# Altium schematic symbol library Resistor.SchLib: 1085 symbols (part 9 of 29)
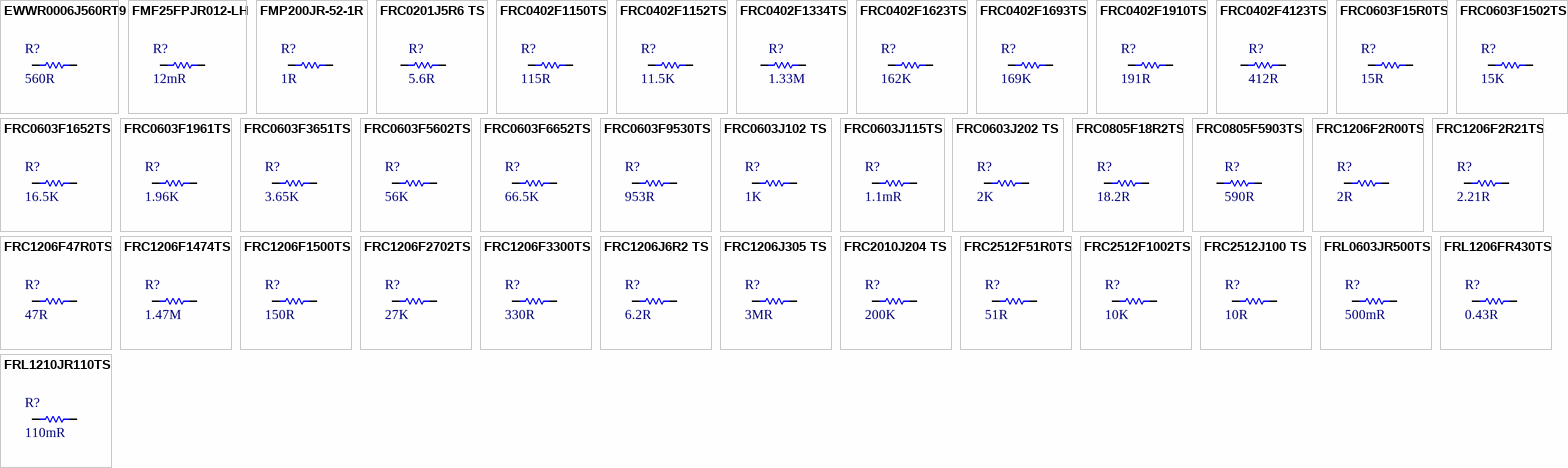
[diagram p35: symbols EWWR0006J560RT9 to FRL1210JR110TS]

## FRC0603F3651TS
designator R?, comment 3.65K
100mW Thick Film Resistors 75V ±100ppm/℃ ±1% 3.65kΩ 0603 Chip Resistor - Surface Mount ROHS; Manufacturer: FOJAN; Manufacturer Part Number: FRC0603F3651TS; Package: 0603; LCSC Part Number: C2930089; Item Type: Resistor; ComponentLink1Description: LCSC; ComponentLink1URL: https://www.lcsc.com/product-detail/Chip-Resistor-Surface-Mount_FOJAN-FRC0603F3651TS_C2930089.html
footprint Res-0603
pins: 1, 2

## FRC0603F5602TS
designator R?, comment 56K
100mW Thick Film Resistors 75V ±100ppm/℃ ±1% 56kΩ 0603 Chip Resistor - Surface Mount ROHS; Manufacturer: FOJAN; Manufacturer Part Number: FRC0603F5602TS; Package: 0603; LCSC Part Number: C2907053; Item Type: Resistor; ComponentLink1Description: LCSC; ComponentLink1URL: https://www.lcsc.com/product-detail/Chip-Resistor-Surface-Mount_FOJAN-FRC0603F5602TS_C2907053.html
footprint Res-0603
pins: 1, 2

## FRC0603F6652TS
designator R?, comment 66.5K
100mW Thick Film Resistors 75V ±100ppm/℃ ±1% 66.5kΩ 0603 Chip Resistor - Surface Mount ROHS; Manufacturer: FOJAN; Manufacturer Part Number: FRC0603F6652TS; Package: 0603; LCSC Part Number: C2933250; Item Type: Resistor; ComponentLink1Description: LCSC; ComponentLink1URL: https://www.lcsc.com/product-detail/Chip-Resistor-Surface-Mount_FOJAN-FRC0603F6652TS_C2933250.html
footprint Res-0603
pins: 1, 2

## FRC0603F9530TS
designator R?, comment 953R
100mW Thick Film Resistors 75V ±100ppm/℃ ±1% 953Ω 0603 Chip Resistor - Surface Mount ROHS; Manufacturer: FOJAN; Manufacturer Part Number: FRC0603F9530TS; Package: 0603; LCSC Part Number: C2933268; Item Type: Resistor; ComponentLink1Description: LCSC; ComponentLink1URL: https://www.lcsc.com/product-detail/Chip-Resistor-Surface-Mount_FOJAN-FRC0603F9530TS_C2933268.html
footprint Res-0603
pins: 1, 2

## FRC0603J102 TS
designator R?, comment 1K
100mW Thick Film Resistors 75V ±100ppm/℃ ±5% 1kΩ 0603 Chip Resistor - Surface Mount ROHS; Manufacturer: FOJAN; Manufacturer Part Number: FRC0603J102 TS; Package: 0603; LCSC Part Number: C2907113; Item Type: Resistor; ComponentLink1Description: LCSC; ComponentLink1URL: https://www.lcsc.com/product-detail/Chip-Resistor-Surface-Mount_FOJAN-FRC0603J102-TS_C2907113.html
footprint Res-0603
pins: 1, 2

## FRC0603J115TS
designator R?, comment 1.1mR
100mW Thick Film Resistors 75V ±100ppm/℃ ±5% 1.1MΩ 0603 Chip Resistor - Surface Mount ROHS; Manufacturer: FOJAN; Manufacturer Part Number: FRC0603J115TS; Package: 0603; LCSC Part Number: C2930018; Item Type: Resistor; ComponentLink1Description: LCSC; ComponentLink1URL: https://www.lcsc.com/product-detail/Chip-Resistor-Surface-Mount_FOJAN-FRC0603J115TS_C2930018.html
footprint Res-0603
pins: 1, 2

## FRC0603J202 TS
designator R?, comment 2K
100mW Thick Film Resistors 75V ±100ppm/℃ ±5% 2kΩ 0603 Chip Resistor - Surface Mount ROHS; Manufacturer: FOJAN; Manufacturer Part Number: FRC0603J202 TS; Package: 0603; LCSC Part Number: C2907137; Item Type: Resistor; ComponentLink1Description: LCSC; ComponentLink1URL: https://www.lcsc.com/product-detail/Chip-Resistor-Surface-Mount_FOJAN-FRC0603J202-TS_C2907137.html
footprint Res-0603
pins: 1, 2

## FRC0805F18R2TS
designator R?, comment 18.2R
125mW Thick Film Resistors 150V ±100ppm/℃ ±1% 18.2Ω 0805 Chip Resistor - Surface Mount ROHS; ComponentLink1Description: LCSC; ComponentLink1URL: *
footprint RES-0805 (SMD 0805)
pins: 1, 2

## FRC0805F5903TS
designator R?, comment 590R
125mW Thick Film Resistors 150V ±100ppm/℃ ±1% 590kΩ 0805 Chip Resistor - Surface Mount ROHS; Manufacturer: FOJAN; Manufacturer Part Number: FRC0805F5903TS; Package: 0805; LCSC Part Number: C2933473; Item Type: Resistor; ComponentLink1Description: LCSC; ComponentLink1URL: https://www.lcsc.com/product-detail/Chip-Resistor-Surface-Mount_FOJAN-FRC0805F5903TS_C2933473.html
footprint RES-0805 (SMD 0805)
pins: 1, 2

## FRC1206F2R00TS
designator R?, comment 2R
0.25W Thick Film Resistors 200V ±1% ±200ppm/℃ 2Ω 1206 Chip Resistor - Surface Mount ROHS; Manufacturer: FOJAN; Manufacturer Part Number: FRC1206F2R00TS; Package: 1206; LCSC Part Number: C2907381; Item Type: Resistor; ComponentLink1Description: LCSC; ComponentLink1URL: https://www.lcsc.com/product-detail/Chip-Resistor-Surface-Mount_FOJAN-FRC1206F2R00TS_C2907381.html?s_z=n_CRCW12062R00FKEA
footprint Res-1206
pins: 1, 2

## FRC1206F2R21TS
designator R?, comment 2.21R
250mW Thick Film Resistors 200V ±200ppm/℃ ±1% 2.21Ω 1206 Chip Resistor - Surface Mount ROHS; Manufacturer: FOJAN; Manufacturer Part Number: FRC1206F2R21TS; Package: 1206; LCSC Part Number: C5126181; Item Type: Resistor; ComponentLink1Description: LCSC; ComponentLink1URL: https://www.lcsc.com/product-detail/Chip-Resistor-Surface-Mount_FOJAN-FRC1206F2R21TS_C5126181.html
footprint Res-1206
pins: 1, 2

## FRC1206F47R0TS
designator R?, comment 47R
250mW Thick Film Resistors 200V ±100ppm/℃ ±1% 47Ω 1206 Chip Resistor - Surface Mount ROHS; Manufacturer: FOJAN; Manufacturer Part Number: FRC1206F47R0TS; Package: 1206; LCSC Part Number: C2933712; Item Type: Resistor; ComponentLink1Description: LCSC; ComponentLink1URL: https://www.lcsc.com/product-detail/Chip-Resistor-Surface-Mount_FOJAN-FRC1206F47R0TS_C2933712.html
footprint Res-1206
pins: 1, 2

## FRC1206F1474TS
designator R?, comment 1.47M
250mW Thick Film Resistors 200V ±100ppm/℃ ±1% 1.47MΩ 1206 Chip Resistor - Surface Mount ROHS; Manufacturer: FOJAN; Manufacturer Part Number: FRC1206F1474TS; Package: 1206; LCSC Part Number: C5126193; Item Type: Resistor; ComponentLink1Description: LCSC; ComponentLink1URL: https://www.lcsc.com/product-detail/Chip-Resistor-Surface-Mount_FOJAN-FRC1206F1474TS_C5126193.html
footprint Res-1206
pins: 1, 2

## FRC1206F1500TS
designator R?, comment 150R
250mW Thick Film Resistors 200V ±100ppm/℃ ±1% 150Ω 1206 Chip Resistor - Surface Mount ROHS; Manufacturer: FOJAN; Manufacturer Part Number: FRC1206F1500TS; Package: 1206; LCSC Part Number: C2933598; Item Type: Resistor; ComponentLink1Description: LCSC; ComponentLink1URL: https://www.lcsc.com/product-detail/Chip-Resistor-Surface-Mount_FOJAN-FRC1206F1500TS_C2933598.html
footprint Res-1206
pins: 1, 2

## FRC1206F2702TS
designator R?, comment 27K
250mW Thick Film Resistors 200V ±100ppm/℃ ±1% 27kΩ 1206 Chip Resistor - Surface Mount ROHS; Manufacturer: FOJAN; Manufacturer Part Number: FRC1206F2702TS; Package: 1206; LCSC Part Number: C2960927; Item Type: Resistor; ComponentLink1Description: LCSC; ComponentLink1URL: https://www.lcsc.com/product-detail/Chip-Resistor-Surface-Mount_FOJAN-FRC1206F2702TS_C2960927.html
footprint Res-1206
pins: 1, 2

## FRC1206F3300TS
designator R?, comment 330R
250mW Thick Film Resistors 200V ±100ppm/℃ ±1% 330Ω 1206 Chip Resistor - Surface Mount ROHS; Manufacturer: FOJAN; Manufacturer Part Number: FRC1206F3300TS; Package: 1206; LCSC Part Number: C2933675; Item Type: Resistor; ComponentLink1Description: LCSC; ComponentLink1URL: https://www.lcsc.com/product-detail/Chip-Resistor-Surface-Mount_FOJAN-FRC1206F3300TS_C2933675.html
footprint Res-1206
pins: 1, 2

## FRC1206J6R2 TS
designator R?, comment 6.2R
250mW Thick Film Resistors 200V ±5% ±200ppm/℃ 6.2Ω 1206 Chip Resistor - Surface Mount ROHS; Manufacturer: FOJAN; Manufacturer Part Number: FRC1206J6R2 TS; LCSC Part Number: C2907521; Item Type: Resistor; Package: 1206
footprint Res-1206
pins: 1, 2

## FRC1206J305 TS
designator R?, comment 3MR
250mW Thick Film Resistors 200V ±100ppm/℃ ±5% 3MΩ 1206 Chip Resistor - Surface Mount ROHS; Manufacturer: FOJAN; Manufacturer Part Number: FRC1206J305 TS; Package: 1206; LCSC Part Number: C2907494; Item Type: Resistor; ComponentLink1Description: LCSC; ComponentLink1URL: https://www.lcsc.com/product-detail/Chip-Resistor-Surface-Mount_FOJAN-FRC1206J305-TS_C2907494.html
footprint Res-1206
pins: 1, 2

## FRC2010J204 TS
designator R?, comment 200K
0.75W Thick Film Resistors 200V ±100ppm/℃ ±5% 200kΩ 2010 Chip Resistor - Surface Mount ROHS; Manufacturer: FOJAN; Manufacturer Part Number: FRC2010J204 TS; Package: 2010; LCSC Part Number: C2960872; Item Type: Resistor; ComponentLink1Description: LCSC; ComponentLink1URL: https://www.lcsc.com/product-detail/Chip-Resistor-Surface-Mount_FOJAN-FRC2010J204-TS_C2960872.html?s_z=n_CRCW2010200KJNEF
footprint RES-2010
pins: 1, 2

## FRC2512F51R0TS
designator R?, comment 51R
1W Thick Film Resistors 200V ±100ppm/℃ ±1% 51Ω 2512 Chip Resistor - Surface Mount ROHS; Manufacturer: FOJAN; Manufacturer Part Number: FRC2512F51R0TS; Package: 2512; LCSC Part Number: C2934078; Item Type: Resistor; ComponentLink1Description: LCSC; ComponentLink1URL: https://www.lcsc.com/product-detail/Chip-Resistor-Surface-Mount_FOJAN-FRC2512F51R0TS_C2934078.html
footprint RES-2512
pins: 1, 2

## FRC2512F1002TS
designator R?, comment 10K
1W Thick Film Resistor 200V ±100ppm/℃ ±1% 10kΩ 2512 Chip Resistor - Surface Mount ROHS; Manufacturer: FOJAN; Manufacturer Part Number: FRC2512F1002TS; Package: 2512; LCSC Part Number: C2934044; Item Type: Resistor; ComponentLink1Description: LCSC; ComponentLink1URL: https://www.lcsc.com/product-detail/C2934044.html
footprint RES-2512
pins: 1, 2

## FRC2512J100 TS
designator R?, comment 10R
1W Thick Film Resistors ±100ppm/℃ ±5% 10Ω 2512 Chip Resistor - Surface Mount ROHS; Manufacturer: FOJAN; Manufacturer Part Number: FRC2512J100 TS; Package: 2512; LCSC Part Number: C2907570; Item Type: Resistor; ComponentLink1Description: LCSC; ComponentLink1URL: https://www.lcsc.com/product-detail/Chip-Resistor-Surface-Mount_FOJAN-FRC2512J100-TS_C2907570.html
footprint RES-2512
pins: 1, 2

## FRL0603JR500TS
designator R?, comment 500mR
100mW Thick Film Resistors 100V ±300ppm/℃ ±5% 500mΩ 0603 Chip Resistor - Surface Mount ROHS; Manufacturer: FOJAN; Manufacturer Part Number: FRL0603JR500TS; Package: 0603; LCSC Part Number: C2930046; Item Type: Resistor; ComponentLink1Description: LCSC; ComponentLink1URL: https://www.lcsc.com/product-detail/Chip-Resistor-Surface-Mount_FOJAN-FRL0603JR500TS_C2930046.html
footprint Res-0603
pins: 1, 2

## FRL1206FR430TS
designator R?, comment 0.43R
0.25W Thick Film Resistors 500V ±1% ±300ppm/℃ 0.43Ω 1206 Chip Resistor - Surface Mount ROHS; Manufacturer: FOJAN; Manufacturer Part Number: FRL1206FR430TS; Package: 1206; LCSC Part Number: C2934294; Item Type: Resistor; ComponentLink1Description: LCSC; ComponentLink1URL: https://www.lcsc.com/product-detail/Chip-Resistor-Surface-Mount_FOJAN-FRL1206FR430TS_C2934294.html?s_z=n_%2520ERJ-8RQFR43V
footprint Res-1206
pins: 1, 2

## FRL1210JR110TS
designator R?, comment 110mR
500mW ±5% 110mΩ 1210 Chip Resistor - Surface Mount ROHS; Manufacturer: FOJAN; Manufacturer Part Number: FRL1210JR110TS; LCSC Part Number: C3000678; Item Type: Resistor; Package: 1210; ComponentLink1Description: LCSC; ComponentLink1URL: https://www.lcsc.com/product-detail/Chip-Resistor-Surface-Mount_RALEC-RTT1214R0FTP_C333127.html
footprint Res_1210
pins: 1, 2

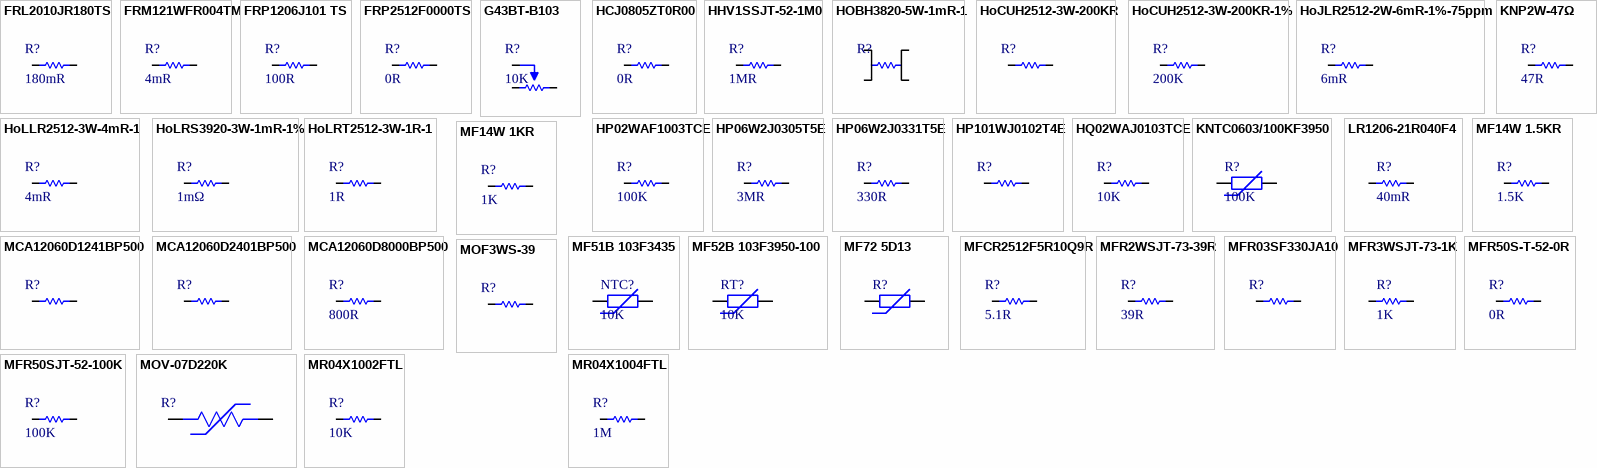
[diagram p9: symbols FRL2010JR180TS to MR04X1004FTL]

## FRL2010JR180TS
designator R?, comment 180mR
750mW Thick Film Resistors 500V ±5% ±600ppm/℃ 180mΩ 2010 Chip Resistor - Surface Mount ROHS; Manufacturer: FOJAN; Manufacturer Part Number: FRL2010JR180TS; Package: 2010; LCSC Part Number: C2934358; Item Type: Resistor; ComponentLink1Description: LCSC; ComponentLink1URL: https://www.lcsc.com/product-detail/Chip-Resistor-Surface-Mount_FOJAN-FRL2010JR180TS_C2934358.html
footprint RES-2010
pins: 1, 2

## FRM121WFR004TM
designator R?, comment 4mR
1W 4mΩ Current Sensing Resistors ±50ppm/℃ ±1% 1206 Current Sense Resistors / Shunt Resistors ROHS; Manufacturer: FOJAN; Manufacturer Part Number: FRM121WFR004TM; Package: 1206; LCSC Part Number: C7420009; Item Type: Resistor; ComponentLink1Description: LCSC; ComponentLink1URL: https://www.lcsc.com/product-detail/Current-Sense-Resistors-Shunt-Resistors_FOJAN-FRM121WFR004TM_C7420009.html
footprint Res-1206
pins: 1, 2

## FRP1206J101 TS
designator R?, comment 100R
500mW Thick Film Resistors 200V ±200ppm/℃ ±5% 100Ω 1206 Chip Resistor - Surface Mount ROHS; Manufacturer: FOJAN; Manufacturer Part Number: FRP1206J101 TS; Package: 1206; LCSC Part Number: C3013376; Item Type: Resistor; ComponentLink1Description: LCSC; ComponentLink1URL: https://www.lcsc.com/product-detail/Chip-Resistor-Surface-Mount_FOJAN-FRP1206J101-TS_C3013376.html
footprint Res-1206
pins: 1, 2

## FRP2512F0000TS
designator R?, comment 0R
2W Thick Film Resistors ±200ppm/℃ ±1% 0Ω 2512 Chip Resistor - Surface Mount ROHS; Manufacturer: FOJAN; Manufacturer Part Number: FRP2512F0000TS; Package: 2512; LCSC Part Number: C5204052; Item Type: Resistor; ComponentLink1Description: LCSC; ComponentLink1URL: https://www.lcsc.com/product-detail/Chip-Resistor-Surface-Mount_FOJAN-FRP2512F0000TS_C5204052.html
footprint RES-2512
pins: 1, 2

## G43BT-B103
designator R?, comment 10K
10kΩ Variable Resistors SMD; Manufacturer: Tokyo Cosmos Elec; Manufacturer Part Number: G43BT-B103; Temperature Coefficient: ±100ppm/℃; Tolerance: ±20%; Resistance: 10kΩ; Type: Variable Resistors; LCSC Part Number: C128146
footprint G43BT-B103_ (±100ppm/? ±20% 10kO Variable Resistors SMD Variable Resistors/Potentiometers ROHS)
pins: 1, 2 Wiper, 3

## HCJ0805ZT0R00
designator R?, comment 0R
HCJ Series 0805 Jumper Surface Mount Chip Resistor; Manufacturer: Stackpole Electronics; Manufacturer Part Number: HCJ0805ZT0R00; Power Rating: 500mW; Supplier: Digikey; Supplier Part Number: HCJ0805ZT0R00CT-ND; RoHS: Yes; Category: Chip SMD Resistors; Stock: 154858; Pricing: 1=0.55, 10=0.397, 25=0.318, 50=0.2364, 100=0.1666, 250=0.14848, 500=0.12726, 1000=0.09696 (USD); Mounting Technology: Surface Mount; Case/Package: 0805; Case Code (Metric): 2012; Case Code (Imperial): 0805; Min Operating Temperature: -55°C; Max Operating Temperature: 155°C; Value: 0R; Packaging: Cut Tape; Package Quantity: 1; Number of Terminations: 2; Series: HCJ; Length: 0.079inch; Width: 0.049inch; Height: 0.026inch; Radiation Hardening: No; Lead Free: Lead Free; RoHS Compliant: Yes; ComponentLink1URL: http://www.seielect.com/Catalog/SEI-HCJ.pdf?src-supplier=Avnet; ComponentLink1Description: http://www.seielect.com/Catalog/SEI-HCJ.pdf?src-supplier=Avnet; ComponentLink2URL: https://www.seielect.com/catalog/SEI-Packaging.pdf?src-supplier=Digikey; ComponentLink2Description: https://www.seielect.com/catalog/SEI-Packaging.pdf?src-supplier=Digikey
footprint Res-0805 (SMD 0805)
pins: 1, 2

## HHV1SSJT-52-1M0
designator R?, comment 1MR
Metal Film Resistors 1MΩ 1W ±200ppm/℃ ±5% Plugin Through Hole Resistors ROHS; Manufacturer: YAGEO; Manufacturer Part Number: HHV1SSJT-52-1M0; Package: Plugin; LCSC Part Number: C432907; Item Type: Through Hole Resistor; ComponentLink1Description: LCSC; ComponentLink1URL: https://www.lcsc.com/product-detail/Through-Hole-Resistors_YAGEO-HHV1SSJT-52-1M0_C432907.html
footprint HHV1SSJT-52-1M0
pins: 1, 2

## HOBH3820-5W-1mR-1
designator R?
5W 1mΩ Through Hole Current Sense Resistor ±50ppm/℃ ±1% Through Hole Current Sense Resistors / Shunt Resistors ROHS; Manufacturer: Milliohm; Manufacturer Part Number: HOBH3820-5W-1mR-1%; Package: Through Hole; LCSC Part Number: C481547; Item Type: Resistor; ComponentLink1Description: LCSC; ComponentLink1URL: https://lcsc.com/product-detail/Current-Sense-Resistors-Shunt-Resistors_Milliohm-HOBH3820-5W-1mR-1_C481547.html?s_z=n_shunt
footprint HOBH3820-5W-1mR-1
pins: 1, 2, 3, 4

## HoCUH2512-3W-200KR
designator R?
3W Thick Film Resistors ±1% 200kΩ 2512 Chip Resistor - Surface Mount ROHS; Manufacturer: Milliohm; Manufacturer Part Number: HoCUH2512-3W-200KR-1%; Package: 2512; LCSC Part Number: C5123645; Item Type: Resistor; ComponentLink1Description: LCSC; ComponentLink1URL: https://www.lcsc.com/product-detail/Chip-Resistor-Surface-Mount_Milliohm-HoCUH2512-3W-200KR-1_C5123645.html
footprint RES-2512
pins: 1, 2

## HoCUH2512-3W-200KR-1%
designator R?, comment 200K
3W ±1% 200kΩ 2512 Chip Resistor - Surface Mount ROHS; Manufacturer: Milliohm; Manufacturer Part Number: HoCUH2512-3W-200KR-1%; Package: 2512; ComponentLink1Description: LCSC; ComponentLink1URL: https://www.lcsc.com/product-detail/Chip-Resistor-Surface-Mount_Milliohm-HoCUH2512-3W-200KR-1_C5123645.html; LCSC Part Number: C5123645; Item Type: Resistor
footprint RES-2512
pins: 1, 2

## HoJLR2512-2W-6mR-1%-75ppm
designator R?, comment 6mR
2W 6mΩ Surface Mount Current Sensing Resistors ±1% 2512 Current Sense Resistors / Shunt Resistors ROHS; Manufacturer: Milliohm; Manufacturer Part Number: HoJLR2512-2W-6mR-1%-75ppm; Package: 2512; LCSC Part Number: C2924529; Item Type: Resistor; ComponentLink1Description: LCSC; ComponentLink1URL: *
footprint RES-2512
pins: 1, 2

## HoLLR2512-3W-4mR-1
designator R?, comment 4mR
3W 4mΩ Surface Mount Current Sense Resistor ±50ppm/℃ ±1% 2512 Current Sense Resistors / Shunt Resistors ROHS; Manufacturer: Milliohm; Manufacturer Part Number: HoLLR2512-3W-4mR-1%; Package: 2512; LCSC Part Number: C2994642; Item Type: Resistor; ComponentLink1Description: LCSC; ComponentLink1URL: https://lcsc.com/product-detail/Current-Sense-Resistors-Shunt-Resistors_Milliohm-HoLLR2512-3W-4mR-1_C2994642.html?s_z=n_PA2512FKE7T0R004E
footprint Res-2512
pins: 1, 2

## HoLRS3920-3W-1mR-1%
designator R?, comment 1mΩ
3W ±1% 1mΩ 3920 Chip Resistor - Surface Mount ROHS; Manufacturer: Milliohm; Manufacturer Part Number: HoLRS3920-3W-1mR-1%; Package: 3920; LCSC Part Number: C5336202; Item Type: Resistor; ComponentLink1Description: LCSC; ComponentLink1URL: C5336202
footprint RES 3920
pins: 1, 2

## HoLRT2512-3W-1R-1
designator R?, comment 1R
3W 1Ω SMD ±50ppm/℃ Current Sense Resistor ±1% 2512 Chip Resistor - Surface Mount RoHS; Manufacturer: Milliohm; Manufacturer Part Number: HoLRT2512-3W-1R-1; Package: 2512; LCSC Part Number: C5127857; Item Type: Resistor; ComponentLink1Description: LCSC; ComponentLink1URL: https://www.lcsc.com/product-detail/C5127857.html
footprint RES-2512
pins: 1, 2

## HP02WAF1003TCE
designator R?, comment 100K
100mW Thick Film Resistors 50V ±100ppm/℃ ±1% 100kΩ 0402 Chip Resistor - Surface Mount ROHS; Manufacturer: UNI-ROYAL; Manufacturer Part Number: HP02WAF1003TCE; Package: 0402; LCSC Part Number: C2759534; Item Type: Resistor; ComponentLink1Description: LCSC; ComponentLink1URL: https://www.lcsc.com/product-detail/Chip-Resistor-Surface-Mount_UNI-ROYAL-Uniroyal-Elec-HP02WAF1003TCE_C2759534.html
footprint Res-0402
pins: 1, 2

## HP06W2J0305T5E
designator R?, comment 3MR
500mW Thick Film Resistors 200V ±100ppm/℃ ±5% 3MΩ 1206 Chip Resistor - Surface Mount ROHS; Manufacturer: UNI-ROYAL; Manufacturer Part Number: HP06W2J0305T5E; Package: 1206; LCSC Part Number: C2759061; Item Type: Resistor; ComponentLink1Description: LCSC; ComponentLink1URL: https://www.lcsc.com/product-detail/Chip-Resistor-Surface-Mount_UNI-ROYAL-Uniroyal-Elec-HP06W2J0305T5E_C2759061.html
footprint Res-1206
pins: 1, 2

## HP06W2J0331T5E
designator R?, comment 330R
500mW Thick Film Resistors 200V ±100ppm/℃ ±5% 330Ω 1206 Chip Resistor - Surface Mount ROHS; Manufacturer: Royal Electronic Factory; Manufacturer Part Number: HP06W2J0331T5E; Supplier: Mouser; LCSC Part Number: C414913; RoHS: Yes; Pricing: 10000=0.006 (USD); Item Type: Resistor
footprint Res-1206
pins: 1, 2

## HP101WJ0102T4E
designator R?
1W 1kΩ 300V ±100ppm/℃ Thick Film Resistor ±5% 2010 Chip Resistor - Surface Mount RoHS; Manufacturer: UNI-ROYAL; Manufacturer Part Number: HP101WJ0102T4E; Package: 2010; LCSC Part Number: C2758967; Item Type: Resistor; ComponentLink1Description: LCSC; ComponentLink1URL: https://www.lcsc.com/product-detail/C2758967.html
footprint RES-2010
pins: 1, 2

## HQ02WAJ0103TCE
designator R?, comment 10K
100mW 50V ±100ppm/℃ ±5% 10kΩ 0402 Chip Resistor - Surface Mount ROHS; Manufacturer: UNI-ROYAL; Manufacturer Part Number: HQ02WAJ0103TCE; Package: 0402; LCSC Part Number: C414854; Item Type: Resistor; ComponentLink1Description: LCSC; ComponentLink1URL: https://www.lcsc.com/product-detail/Chip-Resistor-Surface-Mount_UNI-ROYAL-Uniroyal-Elec-HQ02WAJ0103TCE_C414854.html
footprint Res-0402
pins: 1, 2

## KNP2W-47Ω
designator R?, comment 47R
Wirewound Resistors 47Ω 2W ±350ppm/℃ ±5% Plugin,D5xL15.5mm Through Hole Resistors ROHS; Manufacturer: CCO; Manufacturer Part Number: KNP2W-47Ω±5% T; Package: Plugin,D5xL15.5mm; LCSC Part Number: C122138; Item Type: Resistors; ComponentLink1Description: LCSC; ComponentLink1URL: https://www.lcsc.com/product-detail/Through-Hole-Resistors_CCO-Chian-Chia-Elec-KNP2W-47-5-T_C122138.html
footprint KNP2W-47O±5
pins: 1, 2

## KNTC0603/100KF3950
designator R?, comment 100K
100kΩ 100uA 100mW 3950K ±1% 0603 NTC Thermistors ROHS; Manufacturer: KUU; Manufacturer Part Number: KNTC0603/100KF3950; Package: 0603; LCSC Part Number: C2892545; Item Type: NTC Thermistor; ComponentLink1Description: LCSC; ComponentLink1URL: https://lcsc.com/product-detail/NTC-Thermistors_KUU-KNTC0603-100KF3950_C2892545.html
footprint Res-0603
pins: 1, 2

## LR1206-21R040F4
designator R?, comment 40mR
1W 40mΩ Surface Mount Current Sensing Resistors ±50ppm/℃ ±1% 1206 Current Sense Resistors/Shunt Resistors ROHS; Manufacturer: RALEC; Manufacturer Part Number: LR1206-21R040F4; Package: 1206; LCSC Part Number: C2681030; Item Type: Resistor; ComponentLink1Description: LCSC; ComponentLink1URL: https://www.lcsc.com/product-detail/Current-Sense-Resistors-Shunt-Resistors_RALEC-LR1206-21R040F4_C2681030.html
footprint Res-1206
pins: 1, 2

## MCA12060D1241BP500
designator R?
RES 1.24K OHM 0.1% 1/4W 1206; Manufacturer: Vishay; Manufacturer Part Number: MCA12060D1241BP500; Item Type: Resistors; Max Power Dissipation: 250mW; Value: 1.24kΩ; Temperature Coefficient: 25ppm/°C; Working Voltage: 200V; Supplier: DigiKey; LCSC Part Number: C1711509; RoHS: Compliant; Pricing: 5000=0.16835 (USD); Case/Package: 1206; China RoHS: Non-Compliant; Composition: Thin Film; Height: 550µm; Lead Free: Lead Free; Lifecycle Status: Production; Max Operating Temperature: 125°C; Min Operating Temperature: -55°C; Mounting Technology: Surface Mount; Number of Terminals: 2; Number of Terminations: 2; Packaging: Tape & Reel (TR); Power Dissipation: 250mW; REACH SVHC: Yes; Tolerance: 0.1%; Width: 1.6mm; ComponentLink1URL: https://datasheet.octopart.com:443/MCA12060D1241BP500-Vishay-datasheet-182027962.pdf?src-supplier=IHS; ComponentLink1Description: https://datasheet.octopart.com:443/MCA12060D1241BP500-Vishay-datasheet-182027962.pdf?src-supplier=IHS; ComponentLink2URL: https://datasheet.octopart.com/MCA12060D1241BP500-Vishay-datasheet-13186682.pdf; ComponentLink2Description: https://datasheet.octopart.com/MCA12060D1241BP500-Vishay-datasheet-13186682.pdf; ComponentLink3URL: https://datasheet.octopart.com/MCA12060D1241BP500-Vishay-datasheet-13199943.pdf; ComponentLink3Description: https://datasheet.octopart.com/MCA12060D1241BP500-Vishay-datasheet-13199943.pdf; ComponentLink4URL: https://datasheet.octopart.com/MCA12060D1241BP500-Vishay-datasheet-12542476.pdf; ComponentLink4Description: https://datasheet.octopart.com/MCA12060D1241BP500-Vishay-datasheet-12542476.pdf; ComponentLink5URL: https://datasheet.octopart.com/MCA12060D1241BP500-Vishay-datasheet-12534580.pdf; ComponentLink5Description: https://datasheet.octopart.com/MCA12060D1241BP500-Vishay-datasheet-12534580.pdf; ComponentLink6URL: https://datasheet.octopart.com/MCA12060D1241BP500-Vishay-datasheet-12520137.pdf; ComponentLink6Description: https://datasheet.octopart.com/MCA12060D1241BP500-Vishay-datasheet-12520137.pdf; ComponentLink7URL: https://datasheet.octopart.com/MCA12060D1241BP500-Vishay-datasheet-12510451.pdf; ComponentLink7Description: https://datasheet.octopart.com/MCA12060D1241BP500-Vishay-datasheet-12510451.pdf; ComponentLink8URL: http://sigma.octopart.com:80/rohs_statement/Vishay-company-15.pdf?src-supplier=Compliance+Statements; ComponentLink8Description: http://sigma.octopart.com:80/rohs_statement/Vishay-company-15.pdf?src-supplier=Compliance+Statements
footprint Res-1206
pins: 1, 2

## MCA12060D2401BP500
designator R?
RES 2.4K OHM 0.1% 1/4W 1206; Manufacturer: Vishay; Manufacturer Part Number: MCA12060D2401BP500; Item Type: Resistors; Max Power Dissipation: 250mW; Value: 2.4kΩ; Temperature Coefficient: 25ppm/°C; Voltage Rating: 200V; Supplier: DigiKey; LCSC Part Number: C4249660; RoHS: Compliant; Pricing: 5000=0.16835 (USD); Case/Package: 1206; China RoHS: Non-Compliant; Composition: Thin Film; Depth: 1.6mm; Height: 550µm; Lead Free: Lead Free; Lifecycle Status: Production; Max Operating Temperature: 125°C; Military Standard: Not; Min Operating Temperature: -55°C; Mounting Technology: Surface Mount; Number of Terminals: 2; Number of Terminations: 2; Packaging: Tape & Reel (TR); Power Dissipation: 250mW; Power Rating: 250mW; REACH SVHC: Yes; Tolerance: 0.1%; Width: 1.6mm; Working Voltage: 200V; ComponentLink1URL: https://datasheet.octopart.com:443/MCA12060D2401BP500-Vishay-datasheet-182027962.pdf?src-supplier=IHS; ComponentLink1Description: https://datasheet.octopart.com:443/MCA12060D2401BP500-Vishay-datasheet-182027962.pdf?src-supplier=IHS; ComponentLink2URL: https://datasheet.octopart.com:443/MCA12060D2401BP500-Vishay-datasheet-101751591.pdf?src-supplier=Upverter; ComponentLink2Description: https://datasheet.octopart.com:443/MCA12060D2401BP500-Vishay-datasheet-101751591.pdf?src-supplier=Upverter; ComponentLink3URL: https://datasheet.octopart.com/MCA12060D2401BP500-Vishay-datasheet-13186682.pdf; ComponentLink3Description: https://datasheet.octopart.com/MCA12060D2401BP500-Vishay-datasheet-13186682.pdf; ComponentLink4URL: https://datasheet.octopart.com/MCA12060D2401BP500-Vishay-datasheet-13199943.pdf; ComponentLink4Description: https://datasheet.octopart.com/MCA12060D2401BP500-Vishay-datasheet-13199943.pdf; ComponentLink5URL: https://datasheet.octopart.com/MCA12060D2401BP500-Vishay-datasheet-12542476.pdf; ComponentLink5Description: https://datasheet.octopart.com/MCA12060D2401BP500-Vishay-datasheet-12542476.pdf; ComponentLink6URL: https://datasheet.octopart.com/MCA12060D2401BP500-Vishay-datasheet-12534580.pdf; ComponentLink6Description: https://datasheet.octopart.com/MCA12060D2401BP500-Vishay-datasheet-12534580.pdf; ComponentLink7URL: https://datasheet.octopart.com/MCA12060D2401BP500-Vishay-datasheet-12520137.pdf; ComponentLink7Description: https://datasheet.octopart.com/MCA12060D2401BP500-Vishay-datasheet-12520137.pdf; ComponentLink8URL: https://datasheet.octopart.com/MCA12060D2401BP500-Vishay-datasheet-12510451.pdf; ComponentLink8Description: https://datasheet.octopart.com/MCA12060D2401BP500-Vishay-datasheet-12510451.pdf; ComponentLink9URL: http://sigma.octopart.com:80/rohs_statement/Vishay-company-15.pdf?src-supplier=Compliance+Statements; ComponentLink9Description: http://sigma.octopart.com:80/rohs_statement/Vishay-company-15.pdf?src-supplier=Compliance+Statements
footprint Res-1206
pins: 1, 2

## MCA12060D8000BP500
designator R?, comment 800R
RES 800 OHM 0.1% 1/4W 1206; Manufacturer: Vishay; Manufacturer Part Number: MCA12060D8000BP500; Item Type: Resistors; Max Power Dissipation: 250mW; Value: 800Ω; Temperature Coefficient: 25ppm/°C; Voltage Rating: 200V; Supplier: Mouser; LCSC Part Number: C1711801; RoHS: Compliant; Stock: 4940; Pricing: 1=0.74, 10=0.53, 50=0.53, 100=0.359, 1000=0.297, 10000=0.246 (USD); Case/Package: 1206; Composition: Thin Film; Height: 550µm; Lead Free: Lead Free; Lifecycle Status: Production; Max Operating Temperature: 125°C; Min Operating Temperature: -55°C; Mounting Technology: Surface Mount; Number of Terminals: 2; Number of Terminations: 2; Packaging: Tape & Reel (TR); Power Dissipation: 250mW; Power Rating: 250mW; Tolerance: 0.1%; Width: 1.6mm; Working Voltage: 200V; ComponentLink1URL: https://datasheet.octopart.com:443/MCA12060D8000BP500-Vishay-datasheet-182027962.pdf?src-supplier=IHS; ComponentLink1Description: https://datasheet.octopart.com:443/MCA12060D8000BP500-Vishay-datasheet-182027962.pdf?src-supplier=IHS; ComponentLink2URL: https://datasheet.octopart.com:443/MCA12060D8000BP500-Vishay-datasheet-101751591.pdf?src-supplier=Upverter; ComponentLink2Description: https://datasheet.octopart.com:443/MCA12060D8000BP500-Vishay-datasheet-101751591.pdf?src-supplier=Upverter; ComponentLink3URL: https://datasheet.octopart.com/MCA12060D8000BP500-Vishay-datasheet-13186682.pdf; ComponentLink3Description: https://datasheet.octopart.com/MCA12060D8000BP500-Vishay-datasheet-13186682.pdf; ComponentLink4URL: https://datasheet.octopart.com/MCA12060D8000BP500-Vishay-datasheet-13199943.pdf; ComponentLink4Description: https://datasheet.octopart.com/MCA12060D8000BP500-Vishay-datasheet-13199943.pdf; ComponentLink5URL: https://datasheet.octopart.com/MCA12060D8000BP500-Vishay-datasheet-12542476.pdf; ComponentLink5Description: https://datasheet.octopart.com/MCA12060D8000BP500-Vishay-datasheet-12542476.pdf; ComponentLink6URL: https://datasheet.octopart.com/MCA12060D8000BP500-Vishay-datasheet-12534580.pdf; ComponentLink6Description: https://datasheet.octopart.com/MCA12060D8000BP500-Vishay-datasheet-12534580.pdf; ComponentLink7URL: https://datasheet.octopart.com/MCA12060D8000BP500-Vishay-datasheet-12520137.pdf; ComponentLink7Description: https://datasheet.octopart.com/MCA12060D8000BP500-Vishay-datasheet-12520137.pdf; ComponentLink8URL: https://datasheet.octopart.com/MCA12060D8000BP500-Vishay-datasheet-12510451.pdf; ComponentLink8Description: https://datasheet.octopart.com/MCA12060D8000BP500-Vishay-datasheet-12510451.pdf; ComponentLink9URL: http://sigma.octopart.com:80/rohs_statement/Vishay-company-15.pdf?src-supplier=Compliance+Statements; ComponentLink9Description: http://sigma.octopart.com:80/rohs_statement/Vishay-company-15.pdf?src-supplier=Compliance+Statements
footprint Res-1206
pins: 1, 2

## MF14W 1.5KR
designator R?, comment 1.5K
Metal Film Resistors 1.5kΩ 250mW ±100ppm/℃ ±1% Plugin,D2.3xL6.5mm Through Hole Resistors ROHS; Manufacturer: CCO; Manufacturer Part Number: MF1/4W-1.5KΩ±1% T; Package: Plugin,D2.3xL6.5mm; LCSC Part Number: C119328; Item Type: Resistors; ComponentLink1Description: LCSC; ComponentLink1URL: https://www.lcsc.com/product-detail/Through-Hole-Resistors_CCO-Chian-Chia-Elec-MF1-4W-1-5K-1-T_C119328.html
footprint Plugin,D2.3xL6.5mm
pins: 1, 2

## MF14W 1KR
designator R?, comment 1K
Metal Film Resistors 1kΩ 250mW ±200ppm/℃ ±1% Plugin,D2.3xL6.5mm Through Hole Resistors ROHS; Manufacturer: Huaxing Mechanical-Elec; Manufacturer Part Number: MF1/4W-1KΩ±1%T52; Package: Plugin,D2.3xL6.5mm; LCSC Part Number: C713997; Item Type: Resistors; ComponentLink1Description: LCSC; ComponentLink1URL: https://www.lcsc.com/product-detail/Through-Hole-Resistors_Huaxing-Mechanical-Elec-MF1-4W-1K-1-T52_C713997.html
footprint Plugin,D2.3xL6.5mm
pins: 1, 2

## MF51B 103F3435
designator NTC?, comment 10K
10kΩ 50mW ±1% NTC Thermistors ROHS; Manufacturer: Nanjing Shiheng Elec; Manufacturer Part Number: MF51B 103F3435; LCSC Part Number: C394029; Item Type: NTC Thermistors; ComponentLink1Description: LCSC; ComponentLink1URL: https://lcsc.com/product-detail/NTC-Thermistors_Nanjing-Shiheng-Elec-MF51B-103F3435_C394029.html
footprint MF51B 103F3435
pins: 1, 2

## MF52B 103F3950-100
designator RT?, comment 10K
10kΩ 50mW ±1% 3950K ±1% - NTC Thermistors ROHS; Manufacturer: Nanjing Shiheng Elec; Manufacturer Part Number: MF52B 103F3950-100; Item Type: NTC Thermistor; Package: Custom; ComponentLink1Description: LCSC; ComponentLink1URL: https://www.lcsc.com/product-detail/NTC-Thermistors_Nanjing-Shiheng-Elec-MF52B-103F3950-100_C394021.html; LCSC Part Number: C394021
footprint MF52B 103F3950-100
pins: 1, 2

## MF72 5D13
designator R?
5Ω 5A 4W 2800K ±10% Plugin,P=7.5mm NTC Thermistors ROHS; Manufacturer: Nanjing Shiheng Elec; Manufacturer Part Number: MF72 5D13; Package: Plugin,P=7.5mm; LCSC Part Number: C72683; Item Type: Thermistor; ComponentLink1Description: LCSC; ComponentLink1URL: https://www.lcsc.com/product-detail/NTC-Thermistors_Nanjing-Shiheng-Elec-MF72-5D13_C72683.html?s_z=n_B57236
footprint MF72 5D13
pins: 1, 2

## MFCR2512F5R10Q9R
designator R?, comment 5.1R
2W 5.1Ω Surface Mount Thin Film Resistor ±50ppm/℃ ±1% 2512 Current Sense Resistors / Shunt Resistors ROHS; Manufacturer: RESI; Manufacturer Part Number: MFCR2512F5R10Q9R; Package: 2512; LCSC Part Number: C42460606; Item Type: Resistor; ComponentLink1Description: LCSC; ComponentLink1URL: https://www.lcsc.com/product-detail/C42460606.html
footprint RES-2512
pins: 1, 2

## MFR2WSJT-73-39R
designator R?, comment 39R
Metal Film Resistors 39Ω 2W ±5% Plugin,D4.5xL11.5mm Through Hole Resistors ROHS; Manufacturer: YAGEO; Manufacturer Part Number: MFR2WSJT-73-39R; Package: Plugin,D4.5xL11.5mm; LCSC Part Number: C176578; Item Type: Resistor; ComponentLink1Description: LCSC; ComponentLink1URL: https://www.lcsc.com/product-detail/Through-Hole-Resistors_YAGEO-MFR2WSJT-73-39R_C176578.html
footprint MFR2WSJT-73-39R
pins: 1, 2

## MFR03SF330JA10
designator R?
Metal Film Resistors 33Ω 3W ±50ppm/℃ ±1% Plugin,D5xL15.5mm Through Hole Resistors ROHS; Manufacturer: UNI-ROYAL; Manufacturer Part Number: MFR03SF330JA10; Package: Plugin,D5xL15.5mm; LCSC Part Number: C58749; Item Type: Resistor; ComponentLink1Description: LCSC; ComponentLink1URL: https://www.lcsc.com/product-detail/Through-Hole-Resistors_UNI-ROYAL-Uniroyal-Elec-MFR03SF330JA10_C58749.html
footprint MFR03SF330JA10
pins: 1, 2

## MFR3WSJT-73-1K
designator R?, comment 1K
RES 1K OHM 5% 3W AXIAL; Manufacturer: Yageo; Manufacturer Part Number: MFR3WSJT-73-1K; Item Type: Resistor; Value: 1kR; Supplier: Digikey; LCSC Part Number: C176599; RoHS: Yes; Pricing: 5000=0.04394 (USD); Case/Package: Axial; Min Operating Temperature: -55°C; Max Operating Temperature: 155°C; Series: MFR; Packaging: Tape and Reel; Tolerance: 5%; Max Power Dissipation: 3W; Number of Terminations: 2; RoHS Compliant: Yes; ComponentLink1URL: http://www.yageo.com/NewPortal/yageodocoutput?fileName=/pdf/throughhole/Yageo_LR_MFR_2013.pdf&src-supplier=Digikey; ComponentLink1Description: http://www.yageo.com/NewPortal/yageodocoutput?fileName=/pdf/throughhole/Yageo_LR_MFR_2013.pdf&src-supplier=Digikey
footprint MFR3WSJT-73-1K
pins: 1, 2

## MFR50S-T-52-0R
designator R?, comment 0R
Metal Film Resistors 0Ω 500mW Plugin Through Hole Resistors ROHS; Manufacturer: YAGEO; Manufacturer Part Number: MFR50S-T-52-0R; Package: Plugin; LCSC Part Number: C173163; Item Type: Through Hole Resistor; ComponentLink1Description: LCSC; ComponentLink1URL: https://www.lcsc.com/product-detail/Through-Hole-Resistors_YAGEO-MFR50S-T-52-0R_C173163.html
footprint MFR50S-T-52-0R
pins: 1, 2

## MFR50SJT-52-100K
designator R?, comment 100K
Metal Film Resistors 100kΩ 500mW ±5% Plugin,D2.4xL6.3mm Through Hole Resistors ROHS; Manufacturer: Yageo; Manufacturer Part Number: MFR50SJT-52-100K; Supplier: Mouser; LCSC Part Number: C176621; Stock: 12355; Pricing: 1=0.1, 10=0.071, 50=0.071, 100=0.029, 1000=0.012, 10000=0.008 (USD); ComponentLink1URL: https://datasheet.octopart.com/MFR50SJT-52-100K-Yageo-datasheet-175665672.pdf?src-supplier=Future+Electronics; ComponentLink1Description: https://datasheet.octopart.com/MFR50SJT-52-100K-Yageo-datasheet-175665672.pdf?src-supplier=Future+Electronics; ComponentLink2URL: https://datasheet.octopart.com/MFR50SJT-52-100K-Yageo-datasheet-165493774.pdf?src-supplier=Future+Electronics; ComponentLink2Description: https://datasheet.octopart.com/MFR50SJT-52-100K-Yageo-datasheet-165493774.pdf?src-supplier=Future+Electronics; ComponentLink3URL: https://datasheet.octopart.com/MFR50SJT-52-100K-Yageo-datasheet-28066692.pdf; ComponentLink3Description: https://datasheet.octopart.com/MFR50SJT-52-100K-Yageo-datasheet-28066692.pdf; Item Type: Resistor
footprint MFR50SJT-52-100K
pins: 1, 2

## MOF3WS-39
designator R?
Metal Oxide Resistors 39Ω 3W ±350ppm/℃ ±5% Plugin,D5xL15.5mm Through Hole Resistors ROHS; Manufacturer: CCO; Manufacturer Part Number: MOF3WS-39Ω±5% T; Package: Plugin,D5xL15.5mm; LCSC Part Number: C121798; Item Type: Resistors; ComponentLink1Description: LCSC; ComponentLink1URL: https://www.lcsc.com/product-detail/Through-Hole-Resistors_CCO-Chian-Chia-Elec-MOF3WS-39-5-T_C121798.html
footprint MOF3WS-39
pins: 1, 2

## MOV-07D220K
designator R?
VARISTOR 22V 250A DISC 7MM; Manufacturer: Bourns; Manufacturer Part Number: MOV-07D220K; Capacitance: 2.3nF; Voltage Rating (DC): 24V; Tolerance: 10%; Max Voltage Rating (AC): 14V; Max Voltage Rating (DC): 18V; Number of Circuits: 1; Energy: 1.1J; Clamping Voltage: 43V; Clamping Current: 2.5A; Min Varistor Voltage: 20V; Lead/Base Style: Radial; Item Type: Resistor; Supplier 1: Digi-Key; RoHS: Yes; Category: Varistors; Stock 1: 292; Pricing 1: 1=0.43000, 10=0.30800, 25=0.23920, 100=0.18130, 250=0.12824, 500=0.10260, 1000=0.07866, 2500=0.06840, 5000=0.06156 (USD); Mount: Through Hole,Radial; Case/Package: Radial; Min Operating Temperature: -40°C; Max Operating Temperature: 85°C; Packaging: Bulk; Max Surge Current: 250A; Package Quantity: 2000; Varistor Voltage: 22V; Max Varistor Voltage: 24V; Series: -; Diameter: 7mm; Width: 6.8mm; Lead Pitch: 5mm; Radiation Hardening: No; RoHS Compliant: Yes; Supplier Part Number 1: MOV-07D220K-ND; LCSC Part Number: C1528486; ComponentLink4Description: LCSC; ComponentLink4URL: https://www.lcsc.com/product-detail/Varistors_BOURNS-MOV-07D220K_C1528486.html
footprint MOV-07D220K_
pins: 1, 2

## MR04X1002FTL
designator R?, comment 10K
100mW Thick Film Resistors 50V ±100ppm/℃ ±1% 10kΩ 0402 Chip Resistor - Surface Mount ROHS; Manufacturer: Walsin Tech Corp; Manufacturer Part Number: MR04X1002FTL; Package: 0402; LCSC Part Number: C327797; Item Type: Resistor; ComponentLink1Description: LCSC; ComponentLink1URL: https://www.lcsc.com/product-detail/Chip-Resistor-Surface-Mount_Walsin-Tech-Corp-MR04X1002FTL_C327797.html
footprint Res-0402
pins: 1, 2

## MR04X1004FTL
designator R?, comment 1M
100mW 50V ±100ppm/℃ ±1% 1MΩ 0402 Chip Resistor - Surface Mount ROHS; Manufacturer: UNI-ROYAL; Manufacturer Part Number: MR04X1004FTL; Package: 0402; LCSC Part Number: C327799; Item Type: Resistor; ComponentLink1Description: LCSC; ComponentLink1URL: https://www.lcsc.com/product-detail/Chip-Resistor-Surface-Mount_UNI-ROYAL-Uniroyal-Elec-0201WMF1002TEE_C473048.html
footprint Res-0402
pins: 1, 2

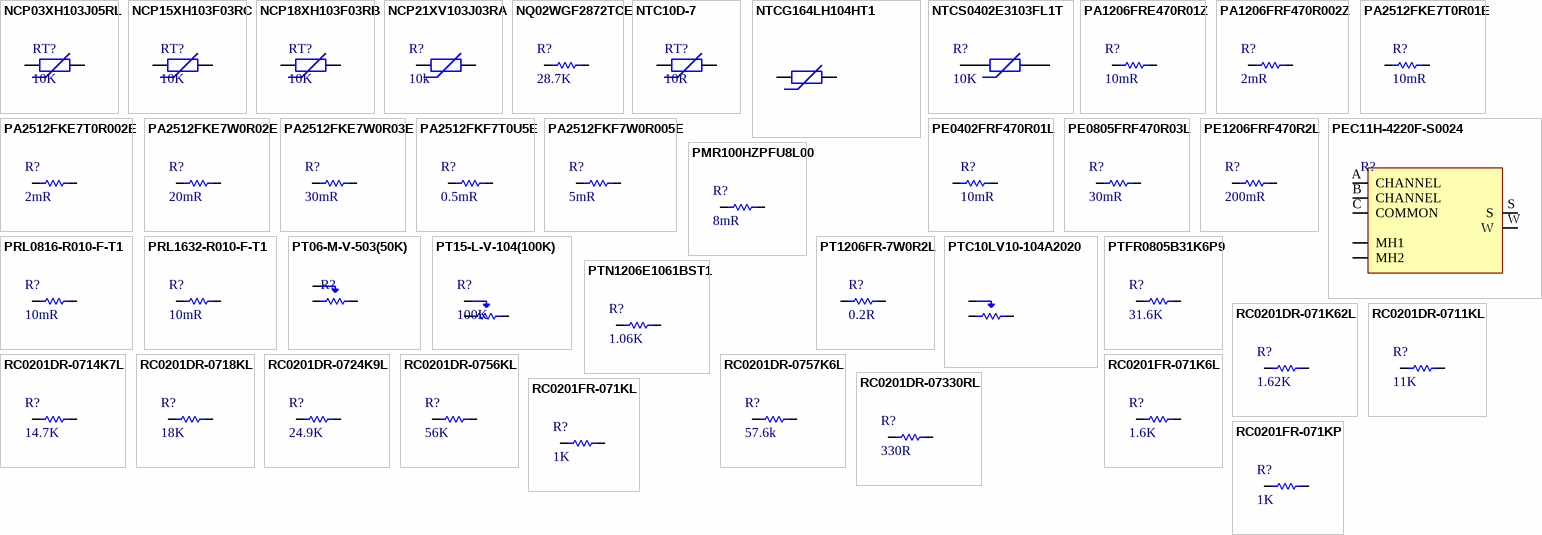
[diagram p10: symbols NCP03XH103J05RL to RC0201FR-071KP]

## NCP03XH103J05RL
designator RT?, comment 10K
Thermistor NTC 10K Ohm 5% 2-Pin 0201 Surface Mount Solder Pad 3434K Paper T/R; Manufacturer: Murata; Manufacturer Part Number: NCP03XH103J05RL; Item Type: Thermistors; Power Rating: 100mW; Current Rating: 310uA; Value: 10kR; Accuracy: 1%; Max Current Rating: 100uA; Voltage Rating: 5V; Supplier: Future Electronics; LCSC Part Number: C914154; RoHS: Yes; Stock: 15000; Pricing: 15000=0.0365, 30000=0.0359, 45000=0.0356, 60000=0.0354, 75000=0.0347 (USD); Mounting Technology: Surface Mount; Case/Package: 0201; Pins: 2; Case Code (Metric): 0603; Case Code (Imperial): 0201; Min Operating Temperature: -40°C; Max Operating Temperature: 125°C; Tolerance: 5%; Packaging: Tape and Reel; Package Quantity: 1; Termination: SMD/SMT; Max Power Dissipation: 100mW; Series: NCP03; Resistance Tolerance: 5%; Length: 0.6mm; Height: 0.3mm; Depth: 0.3mm; Lead Free: Lead Free; RoHS Compliant: Yes; ComponentLink1URL: https://datasheet.ciiva.com/30488/0900766b81259d06-30488178.pdf?src-supplier=Rs; ComponentLink1Description: https://datasheet.ciiva.com/30488/0900766b81259d06-30488178.pdf?src-supplier=Rs; ComponentLink2URL: https://datasheet.ciiva.com/2848/ncp03-spec-2848344.pdf?src-supplier=Digikey; ComponentLink2Description: https://datasheet.ciiva.com/2848/ncp03-spec-2848344.pdf?src-supplier=Digikey; ComponentLink3URL: https://datasheet.ciiva.com/2848/ncp03-spec-2848345.pdf?src-supplier=Digikey; ComponentLink3Description: https://datasheet.ciiva.com/2848/ncp03-spec-2848345.pdf?src-supplier=Digikey; ComponentLink4URL: https://datasheet.ciiva.com/2848/ncp03-spec-2848343.pdf?src-supplier=Digikey; ComponentLink4Description: https://datasheet.ciiva.com/2848/ncp03-spec-2848343.pdf?src-supplier=Digikey
footprint Res-0201
pins: 1, 2

## NCP15XH103F03RC
designator RT?, comment 10K
THERMISTOR NTC 10KOHM 3380K 0402; Manufacturer: Murata; Manufacturer Part Number: NCP15XH103F03RC; Item Type: Thermistors; Tolerance: 1%; Value: 10kR; Power Rating: 100mW; Current Rating: 310uA; Max Current Rating: 100uA; Voltage Rating: 5V; Supplier: Mouser; LCSC Part Number: C77131; RoHS: Yes; Stock: 127865; Pricing: 1=0.1, 10=0.09, 50=0.078, 100=0.071, 1000=0.061, 10000=0.05 (USD); Mounting Technology: Surface Mount; Case/Package: 0402; Pins: 2; Case Code (Metric): 1005; Case Code (Imperial): 0402; Min Operating Temperature: -40°C; Max Operating Temperature: 125°C; Packaging: Tape and Reel; Package Quantity: 1; Max Power Dissipation: 100mW; Termination: SMD/SMT; Series: NCP; Resistance Tolerance: 1%; Length: 1mm; Height: 0.5mm; Depth: 0.5mm; Radiation Hardening: No; Reach SVHC Compliant: No; RoHS Compliant: Yes; ComponentLink1URL: https://datasheet.ciiva.com/2848/r44e-2848224.pdf?src-supplier=Digikey; ComponentLink1Description: https://datasheet.ciiva.com/2848/r44e-2848224.pdf?src-supplier=Digikey; ComponentLink2URL: https://datasheet.ciiva.com/11822/0900766b807f1e39-11822004.pdf?src-supplier=Rs; ComponentLink2Description: https://datasheet.ciiva.com/11822/0900766b807f1e39-11822004.pdf?src-supplier=Rs; ComponentLink3URL: https://datasheet.ciiva.com/2848/r44e-2848223.pdf?src-supplier=Digikey; ComponentLink3Description: https://datasheet.ciiva.com/2848/r44e-2848223.pdf?src-supplier=Digikey; ComponentLink4URL: https://datasheet.ciiva.com/2848/r44e-2848225.pdf?src-supplier=Digikey; ComponentLink4Description: https://datasheet.ciiva.com/2848/r44e-2848225.pdf?src-supplier=Digikey; ComponentLink5URL: https://datasheet.ciiva.com/3280/l0770e-3280495.pdf?src-supplier=Avnet; ComponentLink5Description: https://datasheet.ciiva.com/3280/l0770e-3280495.pdf?src-supplier=Avnet; ComponentLink6URL: https://datasheet.ciiva.com/16208/ncp15wb473j03rc-16208150.pdf?src-supplier=Future+Electronics; ComponentLink6Description: https://datasheet.ciiva.com/16208/ncp15wb473j03rc-16208150.pdf?src-supplier=Future+Electronics
footprint Res-0402
pins: 1, 2

## NCP18XH103F03RB
designator RT?, comment 10K
THERMISTOR NTC 10KOHM 3380K 0603; Manufacturer: Murata; Manufacturer Part Number: NCP18XH103F03RB; Manufacturer Series: NCP18; Item Type: Thermistors; Value: 10kR; Tolerance: 1%; Power Rating: 100mW; Current Rating: 310uA; Accuracy: 0.7%; Thermistor Application: TEMPERATURE COMPENSATION; Max Current Rating: 100uA; Voltage Rating: 5V; Supplier: Future Electronics; LCSC Part Number: C13564; RoHS: Yes; Stock: 140; Pricing: 1=0.295, 15=0.23, 100=0.184, 400=0.151, 2000=0.113 (USD); Mounting Technology: Surface Mount; Case/Package: 0603; Pins: 2; Case Code (Metric): 1608; Case Code (Imperial): 0603; Terminal Finish: Tin; Package Shape: Rectangular; Min Operating Temperature: -40°C; Max Operating Temperature: 125°C; Packaging: Tape and Reel; Package Quantity: 1; Termination: SMD/SMT; Max Power Dissipation: 100mW; Series: NCP; Resistance Tolerance: 1%; Terminal Placement: Dual; Length: 1.6mm; Height: 0.8mm; Depth: 0.8mm; Radiation Hardening: No; Reach SVHC Compliant: No; RoHS Compliant: Yes; Lead Free: 5697LeadFree; ComponentLink1URL: https://datasheet.ciiva.com/11822/0900766b807f1e39-11822112.pdf?src-supplier=Rs; ComponentLink1Description: https://datasheet.ciiva.com/11822/0900766b807f1e39-11822112.pdf?src-supplier=Rs; ComponentLink2URL: https://datasheet.ciiva.com/4504/r44e-3685-4504704.pdf?src-supplier=Mouser; ComponentLink2Description: https://datasheet.ciiva.com/4504/r44e-3685-4504704.pdf?src-supplier=Mouser; ComponentLink3URL: https://datasheet.ciiva.com/2848/r44e-2848446.pdf?src-supplier=Digikey; ComponentLink3Description: https://datasheet.ciiva.com/2848/r44e-2848446.pdf?src-supplier=Digikey; ComponentLink4URL: https://datasheet.ciiva.com/2848/r44e-2848445.pdf?src-supplier=Digikey; ComponentLink4Description: https://datasheet.ciiva.com/2848/r44e-2848445.pdf?src-supplier=Digikey; ComponentLink5URL: https://datasheet.ciiva.com/2848/r44e-2848447.pdf?src-supplier=Digikey; ComponentLink5Description: https://datasheet.ciiva.com/2848/r44e-2848447.pdf?src-supplier=Digikey; ComponentLink6URL: https://datasheet.ciiva.com/3280/l0770e-3280679.pdf?src-supplier=Avnet; ComponentLink6Description: https://datasheet.ciiva.com/3280/l0770e-3280679.pdf?src-supplier=Avnet; ComponentLink7URL: https://datasheet.ciiva.com/16469/l0770e-16469741.pdf?src-supplier=Future+Electronics; ComponentLink7Description: https://datasheet.ciiva.com/16469/l0770e-16469741.pdf?src-supplier=Future+Electronics; ComponentLink8URL: https://datasheet.ciiva.com/17993/getdatasheetpartid-153236-17993210.pdf?src-supplier=Verical; ComponentLink8Description: https://datasheet.ciiva.com/17993/getdatasheetpartid-153236-17993210.pdf?src-supplier=Verical
footprint Res-0603
pins: 1, 2

## NCP21XV103J03RA
designator R?, comment 10k
THERMISTOR NTC 10KOHM 3900K 0805; Manufacturer: Murata Electronics; Manufacturer Part Number: NCP21XV103J03RA; Package: 0805; LCSC Part Number: C73681; Item Type: Thermistor; ComponentLink8Description: LCSC; ComponentLink8URL: https://www.lcsc.com/product-detail/NTC-Thermistors_Murata-Electronics-NCP21XV103J03RA_C73681.html
footprint RES-0805 (SMD 0805)
pins: 1, 2

## NQ02WGF2872TCE
designator R?, comment 28.7K
62.5mW 100V ±1% 28.7kΩ 0402 Chip Resistor - Surface Mount ROHS; Manufacturer: Royal Ohm; Manufacturer Part Number: NQ02WGF2872TCE; Supplier: Mouser; Supplier Part Number: 303-NQ02WGF2872TCE; Pricing: 10000=0.002 (USD); LCSC Part Number: C2779810; Item Type: Resistor
footprint Res-0402
pins: 1, 2

## NTC10D-7
designator RT?, comment 10R
10Ω 1A Plugin,P=5mm NTC Thermistors ROHS; Manufacturer: Ruilon; Manufacturer Part Number: NTC10D-7; Supplier: LCSC; LCSC Part Number: C9176; RoHS: No; Item Type: NTC Thermistor
footprint NTC10D-7
pins: 1, 2

## NTCG164LH104HT1
designator R?
THERM NTC 100KOHM 4485K 0603; Manufacturer: TDK; Manufacturer Part Number: NTCG164LH104HT1; Item Type: NTC Thermistor; Max Power Dissipation: 100mW; Accuracy: 3%; Package: 0603; LCSC Part Number: C136269; ComponentLink1Description: LCSC; Supplier: Digi-Key; Supplier Part Number: 445-2557-1-ND; RoHS: Yes; Category: Thermistors; Stock: 8186; Pricing: 1=0.21, 10=0.179, 25=0.1572, 50=0.1476, 100=0.1259, 500=0.10408, 1000=0.08714 (USD); Mounting Technology: Surface Mount; Case/Package: 0603; Pins: 2; Case Code (Metric): 1608; Case Code (Imperial): 0603; Min Operating Temperature: -40°C; Max Operating Temperature: 125°C; Series: NTCG; Packaging: Tape and Reel; Resistance Tolerance: 3%; Radiation Hardening: No; RoHS Compliant: Yes; ComponentLink2URL: http://www.mouser.com/ds/2/400/pd_ntc-thermistor_ntcg_en-779799.pdf?src-supplier=Mouser; ComponentLink2Description: http://www.mouser.com/ds/2/400/pd_ntc-thermistor_ntcg_en-779799.pdf?src-supplier=Mouser; ComponentLink3URL: https://product.tdk.com/info/en/catalog/datasheets/503021/tpd_commercial_ntc-thermistor_ntcg_en.pdf?ref_disty=digikey&src-supplier=Digi-Key; ComponentLink3Description: https://product.tdk.com/info/en/catalog/datasheets/503021/tpd_commercial_ntc-thermistor_ntcg_en.pdf?ref_disty=digikey&src-supplier=Digi-Key; ComponentLink4URL: http://www.tdk.co.jp/tefe02/eb221_ntcg.pdf?src-supplier=Avnet; ComponentLink4Description: http://www.tdk.co.jp/tefe02/eb221_ntcg.pdf?src-supplier=Avnet
footprint Res-0603
pins: 1, 2

## NTCS0402E3103FL1T
designator R?, comment 10K
NTC SMD 0402 NISN 10K 1% LOW B 1; Manufacturer: Vishay; Manufacturer Part Number: NTCS0402E3103FL1T; Item Type: Thermistor; Supplier 1: Mouser; RoHS: Yes; Category: Thermistors; Stock 1: 56029; Pricing 1: 1=0.51000, 10=0.38800, 50=0.32200, 100=0.27400, 1000=0.20900, 10000=0.17100 (USD); Supplier Part Number 1: 594-NTS0402E3103FL1T; LCSC Part Number: C3153804; ComponentLink1Description: LCSC; ComponentLink1URL: https://lcsc.com/product-detail/span-style-background-color-ff0-NTC-span-Thermistors_Vishay-Intertech-NTCS0402E3103FL1T_C3153804.html
footprint Res-0402
pins: 1, 2

## PA1206FRE470R01Z
designator R?, comment 10mR
RES 0.01 OHM 1% 1W 1206; Manufacturer: Yageo; Manufacturer Part Number: PA1206FRE470R01Z; Item Type: Resistors; Supplier: Future Electronics; Supplier Part Number: 7170942; RoHS: No; Stock: 4000; Pricing: 4000=0.152, 8000=0.149, 12000=0.147, 16000=0.146, 20000=0.142 (USD)
footprint Res-1206
pins: 1, 2

## PA1206FRF470R002Z
designator R?, comment 2mR
RES 0.002 OHM 1% 1W 1206; Manufacturer: Yageo; Manufacturer Part Number: PA1206FRF470R002Z; Item Type: Resistors; Supplier: Digikey; RoHS: Yes; Stock: 3828; Pricing: 1=0.74, 10=0.391, 25=0.3352, 50=0.2794, 100=0.2535, 250=0.22744, 500=0.19442 (USD); RoHS Compliant: Yes
footprint Res-1206
pins: 1, 2

## PA2512FKE7T0R01E
designator R?, comment 10mR
RES 0.01 OHM 1% 3W 2512; Manufacturer: Yageo; Manufacturer Part Number: PA2512FKE7T0R01E; Item Type: Resistor; Supplier: Avnet; LCSC Part Number: C375691; RoHS: No; Stock: 4000; Pricing: 1=0.926, 25=0.703, 50=0.63, 100=0.557, 250=0.485 (USD)
footprint RES-2512
pins: 1, 2

## PA2512FKE7T0R002E
designator R?, comment 2mR
RES 0.002 OHM 1% 3W 2512; Manufacturer: Yageo; Manufacturer Part Number: PA2512FKE7T0R002E; Item Type: Resistors; Supplier: Digikey; LCSC Part Number: C375692; RoHS: Yes; Stock: 3531; Pricing: 1=0.87, 10=0.754, 25=0.662, 50=0.5936, 100=0.5253, 250=0.45696, 500=0.37944, 1000=0.31212 (USD)
footprint RES-2512
pins: 1, 2

## PA2512FKE7W0R02E
designator R?, comment 20mR
RES 0.02 OHM 1% 2W 2512; Manufacturer: Yageo; Manufacturer Part Number: PA2512FKE7W0R02E; Item Type: Resistor; Supplier: Digikey; LCSC Part Number: C375689; RoHS: No; Stock: 3212; Pricing: 1=0.79, 10=0.514, 25=0.4384, 50=0.3908, 100=0.3503, 250=0.306, 500=0.27824, 1000=0.25464 (USD); ComponentLink1URL: https://datasheet.octopart.com/PA2512FKE7W0R02E-Yageo-datasheet-137700559.pdf?src-supplier=Newark; ComponentLink1Description: https://datasheet.octopart.com/PA2512FKE7W0R02E-Yageo-datasheet-137700559.pdf?src-supplier=Newark
footprint RES-2512
pins: 1, 2